# Altium footprint library WCAP-FTDB.PcbLib: 32 footprints (part 2 of 2)
Each footprint in its own frame and in the unit in brackets; x right, y up, seen from the top. Pads: shape width x height; smd on the part's side, far side on the other; paste and mask are expansions set on the pad; w line width, h text height; cw(c..) or ccw(c..) is an arc to the next point about the centre after c.
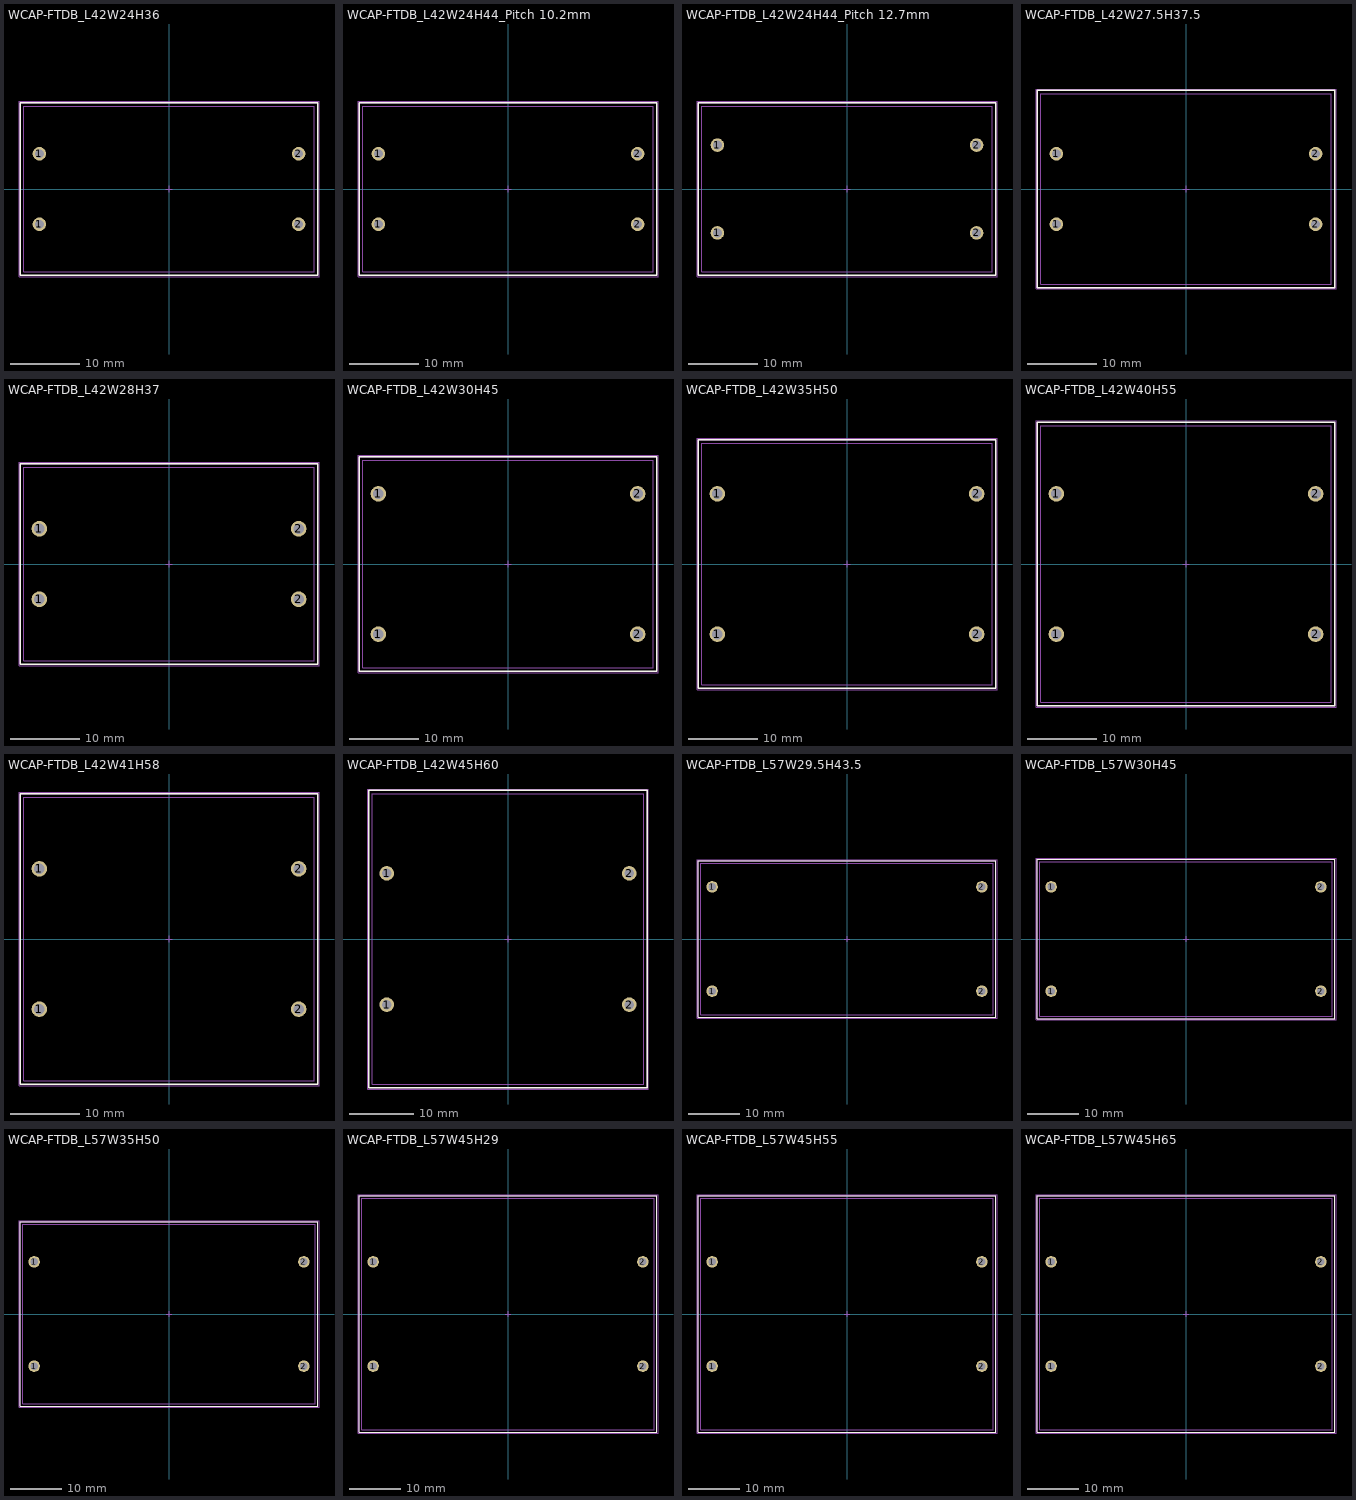
[diagram p1: the footprints below, top view; thin cyan lines are the x and y axes]

## WCAP-FTDB_L42W24H36 [mm] "Film Capacitor, THT, body 42.00x24.00mm"
height 36
pads (4):
  round 1.95 hole 1.3: 1(-18.75,-5.1) 1(-18.75,5.1) 2(18.75,-5.1) 2(18.75,5.1)
Top Overlay:
  lines w0.2: -21.5,-12.5 21.5,-12.5 21.5,12.5 -21.5,12.5 -21.5,-12.5
Top Assembly:
  lines w0.1: -21.5,-12.5 21.5,-12.5 21.5,12.5 -21.5,12.5 -21.5,-12.5
Top Designator:
  text ".Designator" at -3.647,-0.357 h1
Top 3D Body:
  lines w0.1: -21,-12 21,-12 21,12 -21,12 -21,-12
Top Courtyard:
  lines w0.05: -21.7,-12.7 21.7,-12.7 21.7,12.7 -21.7,12.7 -21.7,-12.7
Top Component Center:
  lines w0.1: -0.5,0 0.5,0 ; 0,-0.5 0,0.5
3D body "37.5x42x24x36.stp": height 36.1, standoff -3.9, extent -21,-12 21,12

## WCAP-FTDB_L42W24H44_Pitch 10.2mm [mm] "Film Capacitor, THT, body 42.00x24.00mm"
height 44
pads (4):
  round 1.95 hole 1.3: 1(-18.75,-5.1) 1(-18.75,5.1) 2(18.75,-5.1) 2(18.75,5.1)
Top Overlay:
  lines w0.2: -21.5,-12.5 21.5,-12.5 21.5,12.5 -21.5,12.5 -21.5,-12.5
Top Assembly:
  lines w0.1: -21.5,-12.5 21.5,-12.5 21.5,12.5 -21.5,12.5 -21.5,-12.5
Top Designator:
  text ".Designator" at -3.647,-0.357 h1
Top 3D Body:
  lines w0.1: -21,-12 21,-12 21,12 -21,12 -21,-12
Top Courtyard:
  lines w0.05: -21.7,-12.7 21.7,-12.7 21.7,12.7 -21.7,12.7 -21.7,-12.7
Top Component Center:
  lines w0.1: -0.5,0 0.5,0 ; 0,-0.5 0,0.5
3D body "37.5x42x24x44.stp": height 44.2, standoff -3.8, extent -21,-12 21,12

## WCAP-FTDB_L42W24H44_Pitch 12.7mm [mm] "Film Capacitor, THT, body 42.00x24.00mm"
height 44
pads (4):
  round 1.95 hole 1.3: 1(-18.75,-6.35) 1(-18.75,6.35) 2(18.75,-6.35) 2(18.75,6.35)
Top Overlay:
  lines w0.2: -21.5,-12.5 -21.5,12.5 21.5,12.5 21.5,-12.5 -21.5,-12.5
Top Assembly:
  lines w0.1: -21.5,-12.5 -21.5,12.5 21.5,12.5 21.5,-12.5 -21.5,-12.5
Top Designator:
  text ".Designator" at -3.647,-0.357 h1
Top 3D Body:
  lines w0.1: -21,-12 -21,12 21,12 21,-12 -21,-12
Top Courtyard:
  lines w0.05: -21.7,-12.7 -21.7,12.7 21.7,12.7 21.7,-12.7 -21.7,-12.7
Top Component Center:
  lines w0.1: -0.5,0 0.5,0 ; 0,-0.5 0,0.5
3D body "37.5x42x24x44.stp": height 44.2, standoff -3.8, extent -21,-12 21,12

## WCAP-FTDB_L42W27.5H37.5 [mm] "Film Capacitor, THT, body 42.00x27.50mm"
height 37.5
pads (4):
  round 1.95 hole 1.3: 1(-18.75,-5.1) 1(-18.75,5.1) 2(18.75,-5.1) 2(18.75,5.1)
Top Overlay:
  lines w0.2: -21.5,-14.25 21.5,-14.25 21.5,14.25 -21.5,14.25 -21.5,-14.25
Top Assembly:
  lines w0.1: -21.5,-14.25 21.5,-14.25 21.5,14.25 -21.5,14.25 -21.5,-14.25
Top Designator:
  text ".Designator" at -3.647,-0.357 h1
Top 3D Body:
  lines w0.1: -21,-13.75 21,-13.75 21,13.75 -21,13.75 -21,-13.75
Top Courtyard:
  lines w0.05: -21.7,-14.45 21.7,-14.45 21.7,14.45 -21.7,14.45 -21.7,-14.45
Top Component Center:
  lines w0.1: -0.5,0 0.5,0 ; 0,-0.5 0,0.5
3D body "37.5x42x27.5x37.5.stp": height 37.65, standoff -3.85, extent -21,-13.75 21,13.75

## WCAP-FTDB_L42W28H37 [mm] "Film Capacitor, THT, body 42.00x28.00mm"
height 37
pads (4):
  round 2.25 hole 1.5: 1(-18.75,-5.1) 1(-18.75,5.1) 2(18.75,-5.1) 2(18.75,5.1)
Top Overlay:
  lines w0.2: -21.5,-14.5 21.5,-14.5 21.5,14.5 -21.5,14.5 -21.5,-14.5
Top Assembly:
  lines w0.1: -21.5,-14.5 -21.5,14.5 21.5,14.5 21.5,-14.5 -21.5,-14.5
Top Designator:
  text ".Designator" at -3.647,-0.357 h1
Top 3D Body:
  lines w0.1: -21,-14 21,-14 21,14 -21,14 -21,-14
Top Courtyard:
  lines w0.05: -21.7,-14.7 21.7,-14.7 21.7,14.7 -21.7,14.7 -21.7,-14.7
Top Component Center:
  lines w0.1: -0.5,0 0.5,0 ; 0,-0.5 0,0.5
3D body "37.5x42x28x37.stp": height 37.1, standoff -3.9, extent -21,-14 21,14

## WCAP-FTDB_L42W30H45 [mm] "Film Capacitor, THT, body 42.00x30.00mm"
height 45
pads (4):
  round 2.25 hole 1.5: 1(-18.75,-10.15) 1(-18.75,10.15) 2(18.75,-10.15) 2(18.75,10.15)
Top Overlay:
  lines w0.2: -21.5,-15.5 21.5,-15.5 21.5,15.5 -21.5,15.5 -21.5,-15.5
Top Assembly:
  lines w0.1: -21.5,-15.5 21.5,-15.5 21.5,15.5 -21.5,15.5 -21.5,-15.5
Top Designator:
  text ".Designator" at -3.647,-0.357 h1
Top 3D Body:
  lines w0.1: -21,-15 21,-15 21,15 -21,15 -21,-15
Top Courtyard:
  lines w0.05: -21.7,-15.7 21.7,-15.7 21.7,15.7 -21.7,15.7 -21.7,-15.7
Top Component Center:
  lines w0.1: -0.5,0 0.5,0 ; 0,-0.5 0,0.5
3D body "37.5x42x30x45.stp": height 45.1, standoff -3.9, extent -21,-15 21,15

## WCAP-FTDB_L42W35H50 [mm] "Film Capacitor, THT, body 42.00x35.00mm"
height 50
pads (4):
  round 2.25 hole 1.5: 1(-18.75,-10.15) 1(-18.75,10.15) 2(18.75,-10.15) 2(18.75,10.15)
Top Overlay:
  lines w0.2: -21.5,-18 21.5,-18 21.5,18 -21.5,18 -21.5,-18
Top Assembly:
  lines w0.1: -21.5,-18 21.5,-18 21.5,18 -21.5,18 -21.5,-18
Top Designator:
  text ".Designator" at -3.647,-0.357 h1
Top 3D Body:
  lines w0.1: -21,-17.5 21,-17.5 21,17.5 -21,17.5 -21,-17.5
Top Courtyard:
  lines w0.05: -21.7,-18.2 21.7,-18.2 21.7,18.2 -21.7,18.2 -21.7,-18.2
Top Component Center:
  lines w0.1: -0.5,0 0.5,0 ; 0,-0.5 0,0.5
3D body "37.5x42x35x50.stp": height 50.1, standoff -3.9, extent -21,-17.5 21,17.5

## WCAP-FTDB_L42W40H55 [mm] "Film Capacitor, THT, body 42.00x40.00mm"
height 55
pads (4):
  round 2.25 hole 1.5: 1(-18.75,-10.15) 1(-18.75,10.15) 2(18.75,-10.15) 2(18.75,10.15)
Top Overlay:
  lines w0.2: -21.5,-20.5 -21.5,20.5 21.5,20.5 21.5,-20.5 -21.5,-20.5
Top Assembly:
  lines w0.1: -21.5,-20.5 -21.5,20.5 21.5,20.5 21.5,-20.5 -21.5,-20.5
Top Designator:
  text ".Designator" at -3.647,-0.357 h1
Top 3D Body:
  lines w0.1: -21,-20 -21,20 21,20 21,-20 -21,-20
Top Courtyard:
  lines w0.05: -21.7,-20.7 -21.7,20.7 21.7,20.7 21.7,-20.7 -21.7,-20.7
Top Component Center:
  lines w0.1: -0.5,0 0.5,0 ; 0,-0.5 0,0.5
3D body "37.5x42x40x55.stp": height 55.3, standoff -3.7, extent -21,-20 21,20

## WCAP-FTDB_L42W41H58 [mm] "Film Capacitor, THT, body 42.00x41.00mm"
height 58
pads (4):
  round 2.25 hole 1.5: 1(-18.75,-10.15) 1(-18.75,10.15) 2(18.75,-10.15) 2(18.75,10.15)
Top Overlay:
  lines w0.2: -21.5,-21 21.5,-21 21.5,21 -21.5,21 -21.5,-21
Top Assembly:
  lines w0.1: -21.5,-21 21.5,-21 21.5,21 -21.5,21 -21.5,-21
Top Designator:
  text ".Designator" at -3.647,-0.357 h1
Top 3D Body:
  lines w0.1: -21,-20.5 21,-20.5 21,20.5 -21,20.5 -21,-20.5
Top Courtyard:
  lines w0.05: -21.7,-21.2 21.7,-21.2 21.7,21.2 -21.7,21.2 -21.7,-21.2
Top Component Center:
  lines w0.1: -0.5,0 0.5,0 ; 0,-0.5 0,0.5
3D body "37.5x42x41x58.stp": height 58.2, standoff -3.8, extent -21,-20.5 21,20.5

## WCAP-FTDB_L42W45H60 [mm] "Film Capacitor, THT, body 42.00x45.00mm"
height 60
pads (4):
  round 2.25 hole 1.5: 1(-18.75,-10.15) 1(-18.75,10.15) 2(18.75,-10.15) 2(18.75,10.15)
Top Overlay:
  lines w0.2: -21.5,-23 -21.5,23 21.5,23 21.5,-23 -21.5,-23
Top Assembly:
  lines w0.1: -21.5,-23 -21.5,23 21.5,23 21.5,-23 -21.5,-23
Top Designator:
  text ".Designator" at -3.647,-0.357 h1
Top 3D Body:
  lines w0.1: -21,-22.5 -21,22.5 21,22.5 21,-22.5 -21,-22.5
Top Courtyard:
  lines w0.05: -21.7,-23.2 -21.7,23.2 21.7,23.2 21.7,-23.2 -21.7,-23.2
Top Component Center:
  lines w0.1: -0.5,0 0.5,0 ; 0,-0.5 0,0.5
3D body "37.5x42x45x60.stp": height 60.3, standoff -3.7, extent -21,-22.5 21,22.5

## WCAP-FTDB_L57W29.5H43.5 [mm] "Film Capacitor, THT, body 57.00x29.50mm"
height 43.5
pads (4):
  round 2.25 hole 1.5: 1(-26.25,-10.15) 1(-26.25,10.15) 2(26.25,-10.15) 2(26.25,10.15)
Top Overlay:
  lines w0.2: -29,-15.25 -29,15.25 29,15.25 29,-15.25 -29,-15.25
Top Assembly:
  lines w0.1: -29,-15.25 -29,15.25 29,15.25 29,-15.25 -29,-15.25
Top Designator:
  text ".Designator" at -3.647,-0.357 h1
Top 3D Body:
  lines w0.1: -28.5,-14.75 -28.5,14.75 28.5,14.75 28.5,-14.75 -28.5,-14.75
Top Courtyard:
  lines w0.05: -29.2,-15.45 -29.2,15.45 29.2,15.45 29.2,-15.45 -29.2,-15.45
Top Component Center:
  lines w0.1: -0.5,0 0.5,0 ; 0,-0.5 0,0.5
3D body "52.5x57x29.5x43.5.stp": height 43.55, standoff -4.1, extent -28.5,-14.75 28.5,14.75

## WCAP-FTDB_L57W30H45 [mm] "Film Capacitor, THT, body 57.00x30.00mm"
height 45
pads (4):
  round 2.25 hole 1.5: 1(-26.25,-10.15) 1(-26.25,10.15) 2(26.25,-10.15) 2(26.25,10.15)
Top Overlay:
  lines w0.2: -29,-15.5 29,-15.5 29,15.5 -29,15.5 -29,-15.5
Top Assembly:
  lines w0.1: -29,-15.5 29,-15.5 29,15.5 -29,15.5 -29,-15.5
Top Designator:
  text ".Designator" at -3.647,-0.357 h1
Top 3D Body:
  lines w0.1: -28.5,-15 28.5,-15 28.5,15 -28.5,15 -28.5,-15
Top Courtyard:
  lines w0.05: -29.2,-15.7 29.2,-15.7 29.2,15.7 -29.2,15.7 -29.2,-15.7
Top Component Center:
  lines w0.1: -0.5,0 0.5,0 ; 0,-0.5 0,0.5
3D body "52.5x57x30x45.stp": height 45.35, standoff -3.65, extent -28.5,-15 28.5,15

## WCAP-FTDB_L57W35H50 [mm] "Film Capacitor, THT, body 57.00x35.00mm"
height 50
pads (4):
  round 2.25 hole 1.5: 1(-26.25,-10.15) 1(-26.25,10.15) 2(26.25,-10.15) 2(26.25,10.15)
Top Overlay:
  lines w0.2: -29,-18 29,-18 29,18 -29,18 -29,-18
Top Assembly:
  lines w0.1: -29,-18 29,-18 29,18 -29,18 -29,-18
Top Designator:
  text ".Designator" at -3.647,-0.357 h1
Top 3D Body:
  lines w0.1: -28.5,-17.5 28.5,-17.5 28.5,17.5 -28.5,17.5 -28.5,-17.5
Top Courtyard:
  lines w0.05: -29.2,-18.2 29.2,-18.2 29.2,18.2 -29.2,18.2 -29.2,-18.2
Top Component Center:
  lines w0.1: -0.5,0 0.5,0 ; 0,-0.5 0,0.5
3D body "52.5x57x35x50.stp": height 50.1, standoff -4.05, extent -28.5,-17.5 28.5,17.5

## WCAP-FTDB_L57W45H29 [mm] "Film Capacitor, THT, body 57.00x45.00mm"
height 29
pads (4):
  round 2.25 hole 1.5: 1(-26.25,-10.15) 1(-26.25,10.15) 2(26.25,-10.15) 2(26.25,10.15)
Top Overlay:
  lines w0.2: -29,-23 -29,23 29,23 29,-23 -29,-23
Top Assembly:
  lines w0.1: -29,-23 -29,23 29,23 29,-23 -29,-23
Top Designator:
  text ".Designator" at -3.647,-0.357 h1
Top 3D Body:
  lines w0.1: -28.5,-22.5 -28.5,22.5 28.5,22.5 28.5,-22.5 -28.5,-22.5
Top Courtyard:
  lines w0.05: -29.2,-23.2 -29.2,23.2 29.2,23.2 29.2,-23.2 -29.2,-23.2
Top Component Center:
  lines w0.1: -0.5,0 0.5,0 ; 0,-0.5 0,0.5
3D body "52.5x57x45x29.stp": height 29.1, standoff -3.9, extent -28.5,-22.5 28.5,22.5

## WCAP-FTDB_L57W45H55 [mm] "Film Capacitor, THT, body 57.00x45.00mm"
height 55
pads (4):
  round 2.25 hole 1.5: 1(-26.25,-10.15) 1(-26.25,10.15) 2(26.25,-10.15) 2(26.25,10.15)
Top Overlay:
  lines w0.2: -29,-23 29,-23 29,23 -29,23 -29,-23
Top Assembly:
  lines w0.1: -29,-23 29,-23 29,23 -29,23 -29,-23
Top Designator:
  text ".Designator" at -3.647,-0.357 h1
Top 3D Body:
  lines w0.1: -28.5,-22.5 28.5,-22.5 28.5,22.5 -28.5,22.5 -28.5,-22.5
Top Courtyard:
  lines w0.05: -29.2,-23.2 29.2,-23.2 29.2,23.2 -29.2,23.2 -29.2,-23.2
Top Component Center:
  lines w0.1: -0.5,0 0.5,0 ; 0,-0.5 0,0.5
3D body "52.5x57x45x55.stp": height 55.1, standoff -3.9, extent -28.5,-22.5 28.5,22.5

## WCAP-FTDB_L57W45H65 [mm] "Film Capacitor, THT, body 57.00x45.00mm"
height 65
pads (4):
  round 2.25 hole 1.5: 1(-26.25,-10.15) 1(-26.25,10.15) 2(26.25,-10.15) 2(26.25,10.15)
Top Overlay:
  lines w0.2: -29,-23 -29,23 29,23 29,-23 -29,-23
Top Assembly:
  lines w0.1: -29,-23 -29,23 29,23 29,-23 -29,-23
Top Designator:
  text ".Designator" at -3.647,-0.357 h1
Top 3D Body:
  lines w0.1: -28.5,-22.5 -28.5,22.5 28.5,22.5 28.5,-22.5 -28.5,-22.5
Top Courtyard:
  lines w0.05: -29.2,-23.2 -29.2,23.2 29.2,23.2 29.2,-23.2 -29.2,-23.2
Top Component Center:
  lines w0.1: -0.5,0 0.5,0 ; 0,-0.5 0,0.5
3D body "52.5x57x45x65.stp": height 65.1, standoff -3.9, extent -28.5,-22.5 28.5,22.5